# Altium schematic symbol library AOTA-B201608S1R0MT.SchLib: 1 symbol
Pins are listed as number, name and electrical type; pins without a type are passive.

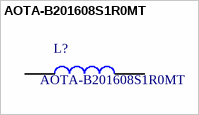
[diagram p0: symbol AOTA-B201608S1R0MT]

## AOTA-B201608S1R0MT
designator L?
IND 1uH 3.7A 52; Manufacturer_Name: ABRACON; Geometry.Height: 0.8mm; Manufacturer_Part_Number: AOTA-B201608S1R0MT; Mouser Part Number: *; Mouser Price/Stock: *; Arrow Part Number: *; Arrow Price/Stock: *; Datasheet Link: https://abracon.com/datasheets/AOTA-B201608S.pdf
footprint INDC2016X80N
pins: 1, 2